# Altium schematic symbol library MountingHardware.SchLib: 2 symbols
Pins are listed as number, name and electrical type; pins without a type are passive.

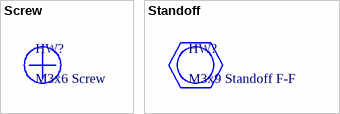
[diagram p0: symbols Screw to Standoff]

## Screw
designator HW?, comment M3x6 Screw

## Standoff
designator HW?, comment M3x9 Standoff F-F